# Altium schematic symbol library 1500pF capacitor 0805.SchLib: 1 symbol
Pins are listed as number, name and electrical type; pins without a type are passive.

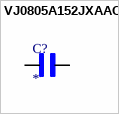
[diagram p0: symbol VJ0805A152JXAAC]

## VJ0805A152JXAAC
designator C?
1500 pF Â±5% 50V Ceramic Capacitor C0G, NP0 0805 (2012 Metric); MF: Vishay Vitramon; MP: VJ0805A152JXAAC; SnapEDA_Link: https://www.snapeda.com/parts/VJ0805A152JXAAC/Vishay/view-part/?ref=snap; Package: 2012 Vishay Vitramon; Value: *; Check_prices: https://www.snapeda.com/parts/VJ0805A152JXAAC/Vishay/view-part/?ref=eda
footprint CAPC2012X145N
pins: 1, 2